# Altium footprint library Connector.PcbLib: 272 footprints (part 2 of 17)
Each footprint in its own frame and in the unit in brackets; x right, y up, seen from the top. Pads: shape width x height; smd on the part's side, far side on the other; paste and mask are expansions set on the pad; w line width, h text height; cw(c..) or ccw(c..) is an arc to the next point about the centre after c.
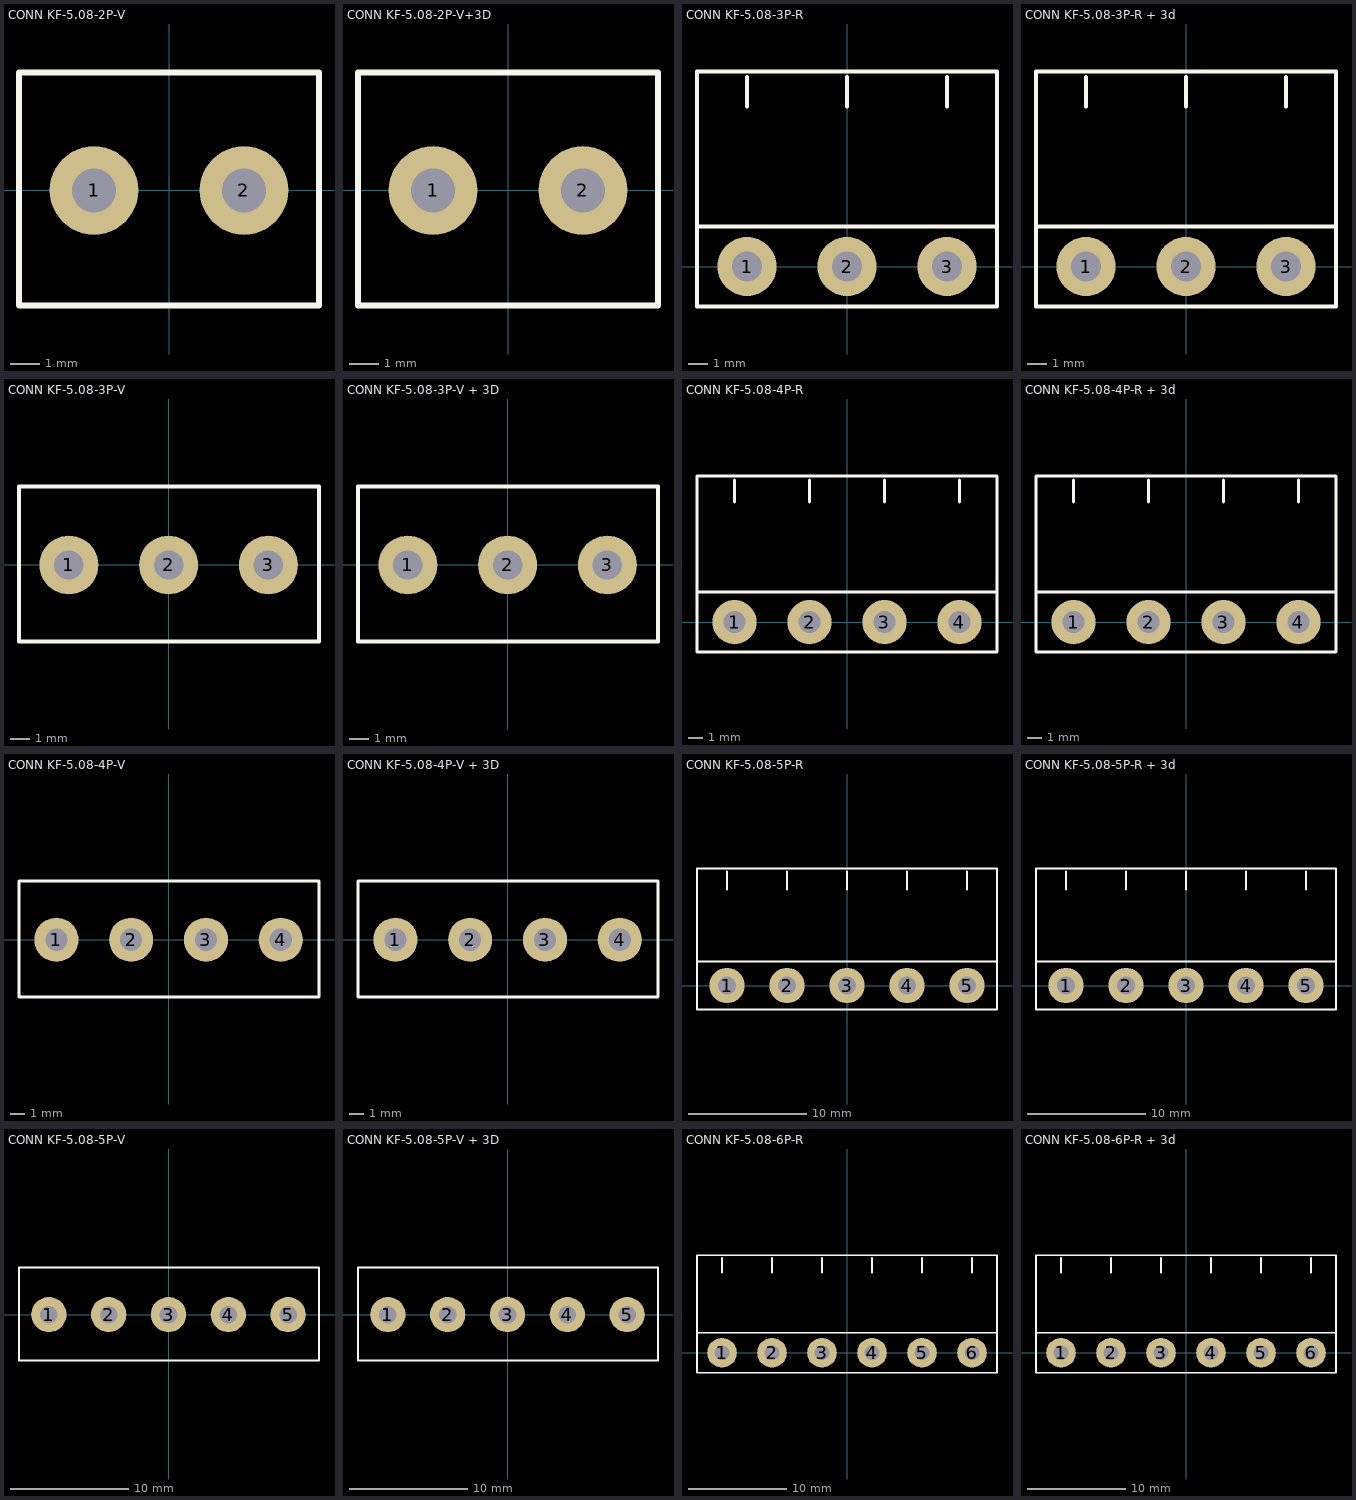
[diagram p1: the footprints below, top view; thin cyan lines are the x and y axes]

## CONN KF-5.08-2P-V [mm] "PHOENIX MSTB 2, 5-G, 5.08mm pitch, 2pin"
pads (2):
  round 3 hole 1.5: 1(-2.54,0) 2(2.54,0)
Top Overlay:
  lines w0.2: -5.08,-3.9 5.08,-3.9 5.08,4 -5.08,4 -5.08,-3.9
Top Designator:
  text ".Designator" at -3.71,0.056 h1.52
3D body "1753437.stp": height 12.1, standoff -3.8, extent -5,-3.8 5,4.8

## CONN KF-5.08-2P-V+3D [mm] "PHOENIX MSTB 2, 5-G, 5.08mm pitch, 2pin"
pads (2):
  round 3 hole 1.5: 1(-2.54,0) 2(2.54,0)
Top Overlay:
  lines w0.2: -5.08,-3.9 5.08,-3.9 5.08,4 -5.08,4 -5.08,-3.9
Top Designator:
  text ".Designator" at -3.71,3.256 h1.52
3D body "PHOENIX_MSTB2W.stp": height 22.4, standoff 4.2, extent -5,-3.8 5,11.2
3D body "1753437.stp": height 12.1, standoff -3.8, extent -5,-3.8 5,4.8

## CONN KF-5.08-3P-R [mm] "PHOENIX MSTB 2, 5-G, 5.08mm pitch, 3pin"
pads (3):
  round 3 hole 1.5: 1(-5.08,0) 2(0,0) 3(5.08,0)
Top Overlay:
  lines w0.2: -7.62,2.032 7.62,2.032 ; -5.08,8.128 -5.08,9.618 ; 0,8.128 0,9.618 ; 5.08,8.128 5.08,9.618 ; -7.62,-2.032 7.62,-2.032 7.62,9.906 -7.62,9.906 -7.62,-2.032
Top Designator:
  text ".Designator" at -3.71,3.593 h1.52
3D body "PHOENIX_MSTB3.stp": height 8.7, standoff -3.4, extent -7.5,-2 7.5,10

## CONN KF-5.08-3P-R + 3d [mm] "PHOENIX MSTB 2, 5-G, 5.08mm pitch, 3pin"
pads (3):
  round 3 hole 1.5: 1(-5.08,0) 2(0,0) 3(5.08,0)
Top Overlay:
  lines w0.2: -7.62,2.032 7.62,2.032 ; -7.366,9.906 7.366,9.906 ; -5.08,8.128 -5.08,9.618 ; 0,8.128 0,9.618 ; 5.08,8.128 5.08,9.618 ; -7.62,-2.032 7.62,-2.032 7.62,9.906 -7.62,9.906 -7.62,-2.032
Top Designator:
  text ".Designator" at -3.71,8.19 h1.52
3D body "PHOENIX_MSTB3w.stp": height 15.1, standoff 0.1, extent -7.5,1 7.5,19.2
3D body "PHOENIX_MSTB3.stp": height 8.7, standoff -3.4, extent -7.5,-2 7.5,10

## CONN KF-5.08-3P-V [mm] "PHOENIX MSTBV 2.5/3-GF-5.08"
pads (3):
  round 3 hole 1.5: 1(-5.08,0) 2(0,0) 3(5.08,0)
Top Overlay:
  lines w0.2: -7.62,-3.9 -7.62,4 7.66,4 7.66,-3.9 -7.62,-3.9
Top Designator:
  text ".Designator" at -3.69,0.056 h1.52
3D body "1753437.stp": height 12.1, standoff -3.8, extent -7.54,-3.8 2.46,4.8
3D body "1753437.stp": height 12.1, standoff -3.8, extent -2.46,-3.8 7.54,4.8

## CONN KF-5.08-3P-V + 3D [mm] "PHOENIX MSTBV 2.5/3-GF-5.08"
pads (3):
  round 3 hole 1.5: 1(-5.08,0) 2(0,0) 3(5.08,0)
Top Overlay:
  lines w0.2: -7.62,-3.9 -7.62,4 7.66,4 7.66,-3.9 -7.62,-3.9
Top Designator:
  text ".Designator" at -3.69,3.256 h1.52
3D body "PHOENIX_MSTB3w.stp": height 22.4, standoff 4.2, extent -7.5,-3.8 7.5,11.2
3D body "1753437.stp": height 12.1, standoff -3.8, extent -7.54,-3.8 2.46,4.8
3D body "1753437.stp": height 12.1, standoff -3.8, extent -2.46,-3.8 7.54,4.8

## CONN KF-5.08-4P-R [mm] "PHOENIX MSTB 2, 5-G, 5.08mm pitch"
pads (4):
  round 3 hole 1.5: 1(-7.62,0) 2(-2.54,0) 3(2.54,0) 4(7.62,0)
Top Overlay:
  lines w0.2: -10.16,2.032 10.16,2.032 ; -9.906,9.906 9.906,9.906 ; -7.62,8.128 -7.62,9.618 ; -2.54,8.128 -2.54,9.618 ; 2.54,8.128 2.54,9.618 ; 7.62,8.128 7.62,9.618 ; -10.16,-2.032 -10.16,9.906 10.16,9.906 10.16,-2.032 -10.16,-2.032
Top Designator:
  text ".Designator" at -3.71,3.593 h1.52
3D body "PHOENIX_MSTB4.stp": height 8.6, standoff -3.5, extent -10,-2 10,10

## CONN KF-5.08-4P-R + 3d [mm] "PHOENIX MSTB 2, 5-G, 5.08mm pitch"
pads (4):
  round 3 hole 1.5: 1(-7.62,0) 2(-2.54,0) 3(2.54,0) 4(7.62,0)
Top Overlay:
  lines w0.2: -10.16,2.032 10.16,2.032 ; -9.906,9.906 9.906,9.906 ; -7.62,8.128 -7.62,9.618 ; -2.54,8.128 -2.54,9.618 ; 2.54,8.128 2.54,9.618 ; 7.62,8.128 7.62,9.618 ; -10.16,-2.032 -10.16,9.906 10.16,9.906 10.16,-2.032 -10.16,-2.032
Top Designator:
  text ".Designator" at -3.71,8.19 h1.52
3D body "PHOENIX_MSTB4w.stp": height 15, standoff 0, extent -10,1 10,19.2
3D body "PHOENIX_MSTB4.stp": height 8.6, standoff -3.5, extent -10,-2 10,10

## CONN KF-5.08-4P-V [mm] "PHOENIX MSTBV 2.5/4-GF-5.08"
pads (4):
  round 3 hole 1.5: 1(-7.62,0) 2(-2.54,0) 3(2.54,0) 4(7.62,0)
Top Overlay:
  lines w0.2: -10.16,-3.9 10.22,-3.9 10.22,4 -10.16,4 -10.16,-3.9
Top Designator:
  text ".Designator" at -3.68,0.056 h1.52
3D body "1753437.stp": height 12.1, standoff -3.8, extent -5,-3.8 5,4.8
3D body "1753437.stp": height 12.1, standoff -3.8, extent -10.08,-3.8 -0.08,4.8
3D body "1753437.stp": height 12.1, standoff -3.8, extent 0.08,-3.8 10.08,4.8

## CONN KF-5.08-4P-V + 3D [mm] "PHOENIX MSTBV 2.5/4-GF-5.08"
pads (4):
  round 3 hole 1.5: 1(-7.62,0) 2(-2.54,0) 3(2.54,0) 4(7.62,0)
Top Overlay:
  lines w0.2: -10.16,-3.9 10.22,-3.9 10.22,4 -10.16,4 -10.16,-3.9
Top Designator:
  text ".Designator" at -3.68,3.256 h1.52
3D body "PHOENIX_MSTB2W.stp": height 22.4, standoff 4.2, extent 0.08,-3.8 10.08,11.2
3D body "PHOENIX_MSTB2W.stp": height 22.4, standoff 4.2, extent -10.08,-3.8 -0.08,11.2
3D body "1753437.stp": height 12.1, standoff -3.8, extent -5,-3.8 5,4.8
3D body "1753437.stp": height 12.1, standoff -3.8, extent -10.08,-3.8 -0.08,4.8
3D body "1753437.stp": height 12.1, standoff -3.8, extent 0.08,-3.8 10.08,4.8

## CONN KF-5.08-5P-R [mm] "PHOENIX MSTB 2, 5-G, 5.08mm pitch"
pads (5):
  round 3 hole 1.5: 1(-10.16,0) 2(-5.08,0) 3(0,0) 4(5.08,0) 5(10.16,0)
Top Overlay:
  lines w0.2: -12.7,2.032 12.7,2.032 ; -12.446,9.906 12.446,9.906 ; -10.16,8.128 -10.16,9.618 ; -5.08,8.128 -5.08,9.618 ; 0,8.128 0,9.618 ; 5.08,8.128 5.08,9.618 ; 10.16,8.128 10.16,9.618 ; -12.7,-2.032 -12.7,9.906 12.7,9.906 12.7,-2.032 -12.7,-2.032
Top Designator:
  text ".Designator" at -3.71,3.593 h1.52
3D body "PHOENIX_MSTB5.stp": height 8.6, standoff -3.5, extent -12.5,-2 12.5,10

## CONN KF-5.08-5P-R + 3d [mm] "PHOENIX MSTB 2, 5-G, 5.08mm pitch"
pads (5):
  round 3 hole 1.5: 1(-10.16,0) 2(-5.08,0) 3(0,0) 4(5.08,0) 5(10.16,0)
Top Overlay:
  lines w0.2: -12.7,2.032 12.7,2.032 ; -12.446,9.906 12.446,9.906 ; -10.16,8.128 -10.16,9.618 ; -5.08,8.128 -5.08,9.618 ; 0,8.128 0,9.618 ; 5.08,8.128 5.08,9.618 ; 10.16,8.128 10.16,9.618 ; -12.7,-2.032 -12.7,9.906 12.7,9.906 12.7,-2.032 -12.7,-2.032
Top Designator:
  text ".Designator" at -3.71,8.19 h1.52
3D body "PHOENIX_MSTB5.stp": height 8.6, standoff -3.5, extent -12.5,-2 12.5,10
3D body "PHOENIX_MSTB5w.stp": height 14.47, standoff -0.53, extent -12.7,1 12.7,19.2

## CONN KF-5.08-5P-V [mm] "PHOENIX MSTBV 2.5/5-GF-5.08"
pads (5):
  round 3 hole 1.5: 1(-10.16,0) 2(-5.08,0) 3(0,0) 4(5.08,0) 5(10.16,0)
Top Overlay:
  lines w0.2: -12.7,-3.9 -12.7,4 12.78,4 12.78,-3.9 -12.7,-3.9
Top Designator:
  text ".Designator" at -3.67,0.056 h1.52
3D body "1753437.stp": height 12.1, standoff -3.8, extent 2.62,-3.8 12.62,4.8
3D body "1753437.stp": height 12.1, standoff -3.8, extent -2.46,-3.8 7.54,4.8
3D body "1753437.stp": height 12.1, standoff -3.8, extent -12.62,-3.8 -2.62,4.8
3D body "1753437.stp": height 12.1, standoff -3.8, extent -7.54,-3.8 2.46,4.8

## CONN KF-5.08-5P-V + 3D [mm] "PHOENIX MSTBV 2.5/5-GF-5.08"
pads (5):
  round 3 hole 1.5: 1(-10.16,0) 2(-5.08,0) 3(0,0) 4(5.08,0) 5(10.16,0)
Top Overlay:
  lines w0.2: -12.7,-3.9 -12.7,4 12.78,4 12.78,-3.9 -12.7,-3.9
Top Designator:
  text ".Designator" at -3.67,3.256 h1.52
3D body "1753437.stp": height 12.1, standoff -3.8, extent 2.62,-3.8 12.62,4.8
3D body "1753437.stp": height 12.1, standoff -3.8, extent -2.46,-3.8 7.54,4.8
3D body "1753437.stp": height 12.1, standoff -3.8, extent -12.62,-3.8 -2.62,4.8
3D body "1753437.stp": height 12.1, standoff -3.8, extent -7.54,-3.8 2.46,4.8
3D body "PHOENIX_MSTB5w.stp": height 22.4, standoff 4.2, extent -12.7,-3.8 12.7,11.2

## CONN KF-5.08-6P-R [mm] "PHOENIX MSTB 2, 5-G, 5.08mm pitch"
pads (6):
  round 3 hole 1.5: 1(-12.7,0) 2(-7.62,0) 3(-2.54,0) 4(2.54,0) 5(7.62,0) 6(12.7,0)
Top Overlay:
  lines w0.2: -15.24,2.032 15.24,2.032 ; -14.986,9.906 14.986,9.906 ; -12.7,8.128 -12.7,9.618 ; -7.62,8.128 -7.62,9.618 ; -2.54,8.128 -2.54,9.618 ; 2.54,8.128 2.54,9.618 ; 7.62,8.128 7.62,9.618 ; 12.7,8.128 12.7,9.618 ; -15.24,-2.032 15.24,-2.032 15.24,9.906 -15.24,9.906 -15.24,-2.032
Top Designator:
  text ".Designator" at -3.71,3.593 h1.52
3D body "PHOENIX_MSTB6.stp": height 8.6, standoff -3.5, extent -15,-2 15,10

## CONN KF-5.08-6P-R + 3d [mm] "PHOENIX MSTB 2, 5-G, 5.08mm pitch"
pads (6):
  round 3 hole 1.5: 1(-12.7,0) 2(-7.62,0) 3(-2.54,0) 4(2.54,0) 5(7.62,0) 6(12.7,0)
Top Overlay:
  lines w0.2: -15.24,2.032 15.24,2.032 ; -14.986,9.906 14.986,9.906 ; -12.7,8.128 -12.7,9.618 ; -7.62,8.128 -7.62,9.618 ; -2.54,8.128 -2.54,9.618 ; 2.54,8.128 2.54,9.618 ; 7.62,8.128 7.62,9.618 ; 12.7,8.128 12.7,9.618 ; -15.24,-2.032 -15.24,9.906 15.24,9.906 15.24,-2.032 -15.24,-2.032
Top Designator:
  text ".Designator" at -3.71,8.19 h1.52
3D body "PHOENIX_MSTB6W.stp": height 15.07, standoff 0.07, extent -15.18,1 15.3,19.2
3D body "PHOENIX_MSTB6.stp": height 8.6, standoff -3.5, extent -15,-2 15,10